# Altium schematic symbol library PrzejścieTHT.SchLib: 1 symbol
Pins are listed as number, name and electrical type; pins without a type are passive.

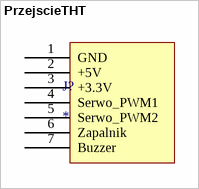
[diagram p0: symbol PrzejscieTHT]

## PrzejscieTHT
designator J?
footprint PrzejscieTHT
pins: 1 GND, 2 +5V, 3 +3.3V, 4 Serwo_PWM1, 5 Serwo_PWM2, 6 Zapalnik, 7 Buzzer